# Altium footprint library TS63421K.PcbLib: 3 footprints
Each footprint in its own frame and in the unit in brackets; x right, y up, seen from the top. Pads: shape width x height; smd on the part's side, far side on the other; paste and mask are expansions set on the pad; w line width, h text height; cw(c..) or ccw(c..) is an arc to the next point about the centre after c.
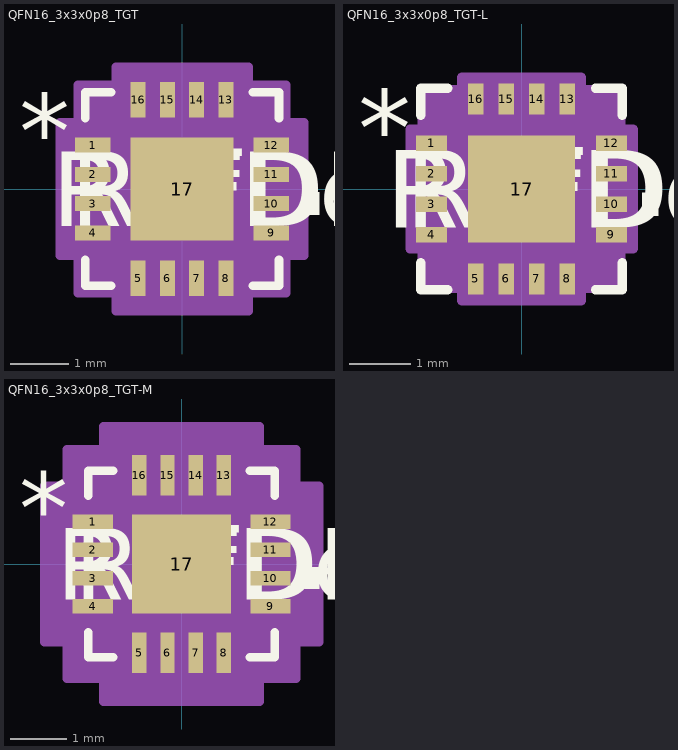
[diagram p0: the footprints below, top view; thin cyan lines are the x and y axes]

## QFN16_3x3x0p8_TGT [mil]
pads (17):
  rect 24x10 smd paste+0 mask+0: 1(-60,29.53) 2(-60,9.84) 3(-60,-9.84) 4(-60,-29.53) 9(60,-29.53) 10(60,-9.84) 11(60,9.84) 12(60,29.53)
  rect 10x24 smd paste+0 mask+0: 5(-29.53,-60) 6(-9.84,-60) 7(9.84,-60) 8(29.53,-60) 13(29.53,60) 14(9.84,60) 15(-9.84,60) 16(-29.53,60)
  rect 69x69 smd paste+0 mask+0: 17(0,0)
Top Overlay:
  region: 82,-2.34 92,-2.34 92,-17.34 82,-17.34
  lines w6: -65,-47.63 -65,-65 -47.63,-65 ; -65,47.63 -65,65 -47.63,65 ; 47.63,-65 65,-65 65,-47.63 ; 47.63,65 65,65 65,47.63
  text "*" at -109.5,14.37 h50
  text "RefDes" at -75,-25 h50
  text "REFDES" at -87.5,-25 h50
Mechanical 13:
  lines w1: -60,10 -10,60 ; -60,-60 60,-60 ; -60,-60 -60,60 ; -60,-60 -60,-60 ; -60,-35.53 -60,-23.53 ; -60,-35.53 -60,-23.53 ; -60,-35.53 -60,-35.53 ; -60,-23.53 -60,-23.53 ; -60,-15.84 -60,-3.84 ; -60,-15.84 -60,-3.84 ; -60,-15.84 -60,-15.84 ; -60,-3.84 -60,-3.84 ; -60,3.84 -60,15.84 ; -60,3.84 -60,15.84 ; -60,3.84 -60,3.84 ; -60,15.84 -60,15.84 ; -60,23.53 -60,35.53 ; -60,23.53 -60,35.53 ; -60,23.53 -60,23.53 ; -60,35.53 -60,35.53 ; -60,60 60,60 ; -60,60 -60,60 ; -35.53,-60 -23.53,-60 ; -35.53,-60 -35.53,-60 ; -35.53,-60 -23.53,-60 ; -35.53,60 -23.53,60 ; -35.53,60 -23.53,60 ; -35.53,60 -35.53,60 ; -23.53,-60 -23.53,-60 ; -23.53,60 -23.53,60 ; -15.84,-60 -3.84,-60 ; -15.84,-60 -15.84,-60 ; -15.84,-60 -3.84,-60 ; -15.84,60 -3.84,60 ; -15.84,60 -3.84,60 ; -15.84,60 -15.84,60 ; -3.84,-60 -3.84,-60 ; -3.84,60 -3.84,60 ; 3.84,-60 15.84,-60 ; 3.84,-60 3.84,-60 ; 3.84,-60 15.84,-60 ; 3.84,60 15.84,60 ; 3.84,60 15.84,60 ; 3.84,60 3.84,60 ; 15.84,-60 15.84,-60 ; 15.84,60 15.84,60 ; 23.53,-60 35.53,-60 ; 23.53,-60 23.53,-60 ; 23.53,-60 35.53,-60 ; 23.53,60 35.53,60 ; 23.53,60 35.53,60 ; 23.53,60 23.53,60 ; 35.53,-60 35.53,-60 ; 35.53,60 35.53,60 ; 60,-60 60,-60 ; 60,-60 60,60 ; 60,-35.53 60,-23.53 ; 60,-35.53 60,-35.53 ; 60,-35.53 60,-23.53 ; 60,-23.53 60,-23.53 ; 60,-15.84 60,-3.84 ; 60,-15.84 60,-15.84 ; 60,-15.84 60,-3.84 ; 60,-3.84 60,-3.84 ; 60,3.84 60,15.84 ; 60,3.84 60,3.84 ; 60,3.84 60,15.84 ; 60,15.84 60,15.84 ; 60,23.53 60,35.53 ; 60,23.53 60,23.53 ; 60,23.53 60,35.53 ; 60,35.53 60,35.53 ; 60,60 60,60
  text "*" at -60.5,14.37 h50
  text "RefDes2" at -87.5,-25 h50
Mechanical 15:
  region: -44.53,-70 -70,-70 -70,-44.53 -82,-44.53 -82,44.53 -70,44.53 -70,70 -44.53,70 -44.53,82 44.53,82 44.53,70 70,70 70,44.53 82,44.53 82,-44.53 70,-44.53 70,-70 44.53,-70 44.53,-82 -44.53,-82
  lines w6: -82,-44.53 -70,-44.53 -70,-70 -44.53,-70 -44.53,-82 44.53,-82 44.53,-70 70,-70 70,-44.53 82,-44.53 82,44.53 70,44.53 70,70 44.53,70 44.53,82 -44.53,82 -44.53,70 -70,70 -70,44.53 -82,44.53 -82,-44.53
3D body "QFN16_3x3x0p8_TGT.step": height 35.12, standoff 0, extent -60,-60 60,60

## QFN16_3x3x0p8_TGT-L [mil]
pads (17):
  rect 20x10 smd paste+0 mask+0: 1(-58,29.53) 2(-58,9.84) 3(-58,-9.84) 4(-58,-29.53) 9(58,-29.53) 10(58,-9.84) 11(58,9.84) 12(58,29.53)
  rect 10x20 smd paste+0 mask+0: 5(-29.53,-58) 6(-9.84,-58) 7(9.84,-58) 8(29.53,-58) 13(29.53,58) 14(9.84,58) 15(-9.84,58) 16(-29.53,58)
  rect 69x69 smd paste+0 mask+0: 17(0,0)
Top Overlay:
  region: 78,-2.34 88,-2.34 88,-17.34 78,-17.34
  lines w6: -65,-47.63 -65,-65 -47.63,-65 ; -65,47.63 -65,65 -47.63,65 ; 47.63,-65 65,-65 65,-47.63 ; 47.63,65 65,65 65,47.63
  text "*" at -105.5,14.37 h50
  text "RefDes" at -75,-25 h50
  text "REFDES" at -87.5,-25 h50
Mechanical 13:
  lines w1: -60,10 -10,60 ; -60,-60 60,-60 ; -60,-60 -60,60 ; -60,-60 -60,-60 ; -60,-35.53 -60,-23.53 ; -60,-35.53 -60,-23.53 ; -60,-35.53 -60,-35.53 ; -60,-23.53 -60,-23.53 ; -60,-15.84 -60,-3.84 ; -60,-15.84 -60,-3.84 ; -60,-15.84 -60,-15.84 ; -60,-3.84 -60,-3.84 ; -60,3.84 -60,15.84 ; -60,3.84 -60,15.84 ; -60,3.84 -60,3.84 ; -60,15.84 -60,15.84 ; -60,23.53 -60,35.53 ; -60,23.53 -60,35.53 ; -60,23.53 -60,23.53 ; -60,35.53 -60,35.53 ; -60,60 60,60 ; -60,60 -60,60 ; -35.53,-60 -23.53,-60 ; -35.53,-60 -35.53,-60 ; -35.53,-60 -23.53,-60 ; -35.53,60 -23.53,60 ; -35.53,60 -23.53,60 ; -35.53,60 -35.53,60 ; -23.53,-60 -23.53,-60 ; -23.53,60 -23.53,60 ; -15.84,-60 -3.84,-60 ; -15.84,-60 -15.84,-60 ; -15.84,-60 -3.84,-60 ; -15.84,60 -3.84,60 ; -15.84,60 -3.84,60 ; -15.84,60 -15.84,60 ; -3.84,-60 -3.84,-60 ; -3.84,60 -3.84,60 ; 3.84,-60 15.84,-60 ; 3.84,-60 3.84,-60 ; 3.84,-60 15.84,-60 ; 3.84,60 15.84,60 ; 3.84,60 15.84,60 ; 3.84,60 3.84,60 ; 15.84,-60 15.84,-60 ; 15.84,60 15.84,60 ; 23.53,-60 35.53,-60 ; 23.53,-60 23.53,-60 ; 23.53,-60 35.53,-60 ; 23.53,60 35.53,60 ; 23.53,60 35.53,60 ; 23.53,60 23.53,60 ; 35.53,-60 35.53,-60 ; 35.53,60 35.53,60 ; 60,-60 60,-60 ; 60,-60 60,60 ; 60,-35.53 60,-23.53 ; 60,-35.53 60,-35.53 ; 60,-35.53 60,-23.53 ; 60,-23.53 60,-23.53 ; 60,-15.84 60,-3.84 ; 60,-15.84 60,-15.84 ; 60,-15.84 60,-3.84 ; 60,-3.84 60,-3.84 ; 60,3.84 60,15.84 ; 60,3.84 60,3.84 ; 60,3.84 60,15.84 ; 60,15.84 60,15.84 ; 60,23.53 60,35.53 ; 60,23.53 60,23.53 ; 60,23.53 60,35.53 ; 60,35.53 60,35.53 ; 60,60 60,60
  text "*" at -60.5,14.37 h50
  text "RefDes2" at -87.5,-25 h50
Mechanical 15:
  region: -38.53,-64 -64,-64 -64,-38.53 -72,-38.53 -72,38.53 -64,38.53 -64,64 -38.53,64 -38.53,72 38.53,72 38.53,64 64,64 64,38.53 72,38.53 72,-38.53 64,-38.53 64,-64 38.53,-64 38.53,-72 -38.53,-72
  lines w6: -72,-38.53 -64,-38.53 -64,-64 -38.53,-64 -38.53,-72 38.53,-72 38.53,-64 64,-64 64,-38.53 72,-38.53 72,38.53 64,38.53 64,64 38.53,64 38.53,72 -38.53,72 -38.53,64 -64,64 -64,38.53 -72,38.53 -72,-38.53
3D body "QFN16_3x3x0p8_TGT.step": height 35.12, standoff 0, extent -60,-60 60,60

## QFN16_3x3x0p8_TGT-M [mil]
pads (17):
  rect 28x10 smd paste+0 mask+0: 1(-62,29.53) 2(-62,9.84) 3(-62,-9.84) 4(-62,-29.53) 9(62,-29.53) 10(62,-9.84) 11(62,9.84) 12(62,29.53)
  rect 10x28 smd paste+0 mask+0: 5(-29.53,-62) 6(-9.84,-62) 7(9.84,-62) 8(29.53,-62) 13(29.53,62) 14(9.84,62) 15(-9.84,62) 16(-29.53,62)
  rect 69x69 smd paste+0 mask+0: 17(0,0)
Top Overlay:
  region: 86,-2.34 96,-2.34 96,-17.34 86,-17.34
  lines w6: -65,-47.63 -65,-65 -47.63,-65 ; -65,47.63 -65,65 -47.63,65 ; 47.63,-65 65,-65 65,-47.63 ; 47.63,65 65,65 65,47.63
  text "*" at -113.5,14.37 h50
  text "RefDes" at -75,-25 h50
  text "REFDES" at -87.5,-25 h50
Mechanical 13:
  lines w1: -60,10 -10,60 ; -60,-60 60,-60 ; -60,-60 -60,60 ; -60,-60 -60,-60 ; -60,-35.53 -60,-23.53 ; -60,-35.53 -60,-23.53 ; -60,-35.53 -60,-35.53 ; -60,-23.53 -60,-23.53 ; -60,-15.84 -60,-3.84 ; -60,-15.84 -60,-3.84 ; -60,-15.84 -60,-15.84 ; -60,-3.84 -60,-3.84 ; -60,3.84 -60,15.84 ; -60,3.84 -60,15.84 ; -60,3.84 -60,3.84 ; -60,15.84 -60,15.84 ; -60,23.53 -60,35.53 ; -60,23.53 -60,35.53 ; -60,23.53 -60,23.53 ; -60,35.53 -60,35.53 ; -60,60 60,60 ; -60,60 -60,60 ; -35.53,-60 -23.53,-60 ; -35.53,-60 -35.53,-60 ; -35.53,-60 -23.53,-60 ; -35.53,60 -23.53,60 ; -35.53,60 -23.53,60 ; -35.53,60 -35.53,60 ; -23.53,-60 -23.53,-60 ; -23.53,60 -23.53,60 ; -15.84,-60 -3.84,-60 ; -15.84,-60 -15.84,-60 ; -15.84,-60 -3.84,-60 ; -15.84,60 -3.84,60 ; -15.84,60 -3.84,60 ; -15.84,60 -15.84,60 ; -3.84,-60 -3.84,-60 ; -3.84,60 -3.84,60 ; 3.84,-60 15.84,-60 ; 3.84,-60 3.84,-60 ; 3.84,-60 15.84,-60 ; 3.84,60 15.84,60 ; 3.84,60 15.84,60 ; 3.84,60 3.84,60 ; 15.84,-60 15.84,-60 ; 15.84,60 15.84,60 ; 23.53,-60 35.53,-60 ; 23.53,-60 23.53,-60 ; 23.53,-60 35.53,-60 ; 23.53,60 35.53,60 ; 23.53,60 35.53,60 ; 23.53,60 23.53,60 ; 35.53,-60 35.53,-60 ; 35.53,60 35.53,60 ; 60,-60 60,-60 ; 60,-60 60,60 ; 60,-35.53 60,-23.53 ; 60,-35.53 60,-35.53 ; 60,-35.53 60,-23.53 ; 60,-23.53 60,-23.53 ; 60,-15.84 60,-3.84 ; 60,-15.84 60,-15.84 ; 60,-15.84 60,-3.84 ; 60,-3.84 60,-3.84 ; 60,3.84 60,15.84 ; 60,3.84 60,3.84 ; 60,3.84 60,15.84 ; 60,15.84 60,15.84 ; 60,23.53 60,35.53 ; 60,23.53 60,23.53 ; 60,23.53 60,35.53 ; 60,35.53 60,35.53 ; 60,60 60,60
  text "*" at -60.5,14.37 h50
  text "RefDes2" at -87.5,-25 h50
Mechanical 15:
  region: -54.53,-80 -80,-80 -80,-54.53 -96,-54.53 -96,54.53 -80,54.53 -80,80 -54.53,80 -54.53,96 54.53,96 54.53,80 80,80 80,54.53 96,54.53 96,-54.53 80,-54.53 80,-80 54.53,-80 54.53,-96 -54.53,-96
  lines w6: -96,-54.53 -80,-54.53 -80,-80 -54.53,-80 -54.53,-96 54.53,-96 54.53,-80 80,-80 80,-54.53 96,-54.53 96,54.53 80,54.53 80,80 54.53,80 54.53,96 -54.53,96 -54.53,80 -80,80 -80,54.53 -96,54.53 -96,-54.53
3D body "QFN16_3x3x0p8_TGT.step": height 35.12, standoff 0, extent -60,-60 60,60